# Altium schematic symbol library DMP4015SK3Q-13.SchLib: 1 symbol
Pins are listed as number, name and electrical type; pins without a type are passive.

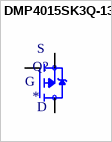
[diagram p0: symbol DMP4015SK3Q-13]

## DMP4015SK3Q-13
designator Q?
P-Channel 40 V 14A (Ta), 35A (Tc) 3.5W (Ta) Surface Mount TO-252-3; MF: Diodes Inc.; MP: DMP4015SK3Q-13; SnapEDA_Link: https://www.snapeda.com/parts/DMP4015SK3Q-13/Diodes+Inc./view-part/?ref=snap; Package: TO-252 Diodes Inc.; Value: *; Check_prices: https://www.snapeda.com/parts/DMP4015SK3Q-13/Diodes+Inc./view-part/?ref=eda
footprint TO-252-3(DPAK)
pins: 1 G, 2 D, 3 S